# Altium footprint library 2.10-LQFP封装.PcbLib: 97 footprints (part 6 of 7)
Each footprint in its own frame and in the unit in brackets; x right, y up, seen from the top. Pads: shape width x height; smd on the part's side, far side on the other; paste and mask are expansions set on the pad; w line width, h text height; cw(c..) or ccw(c..) is an arc to the next point about the centre after c.
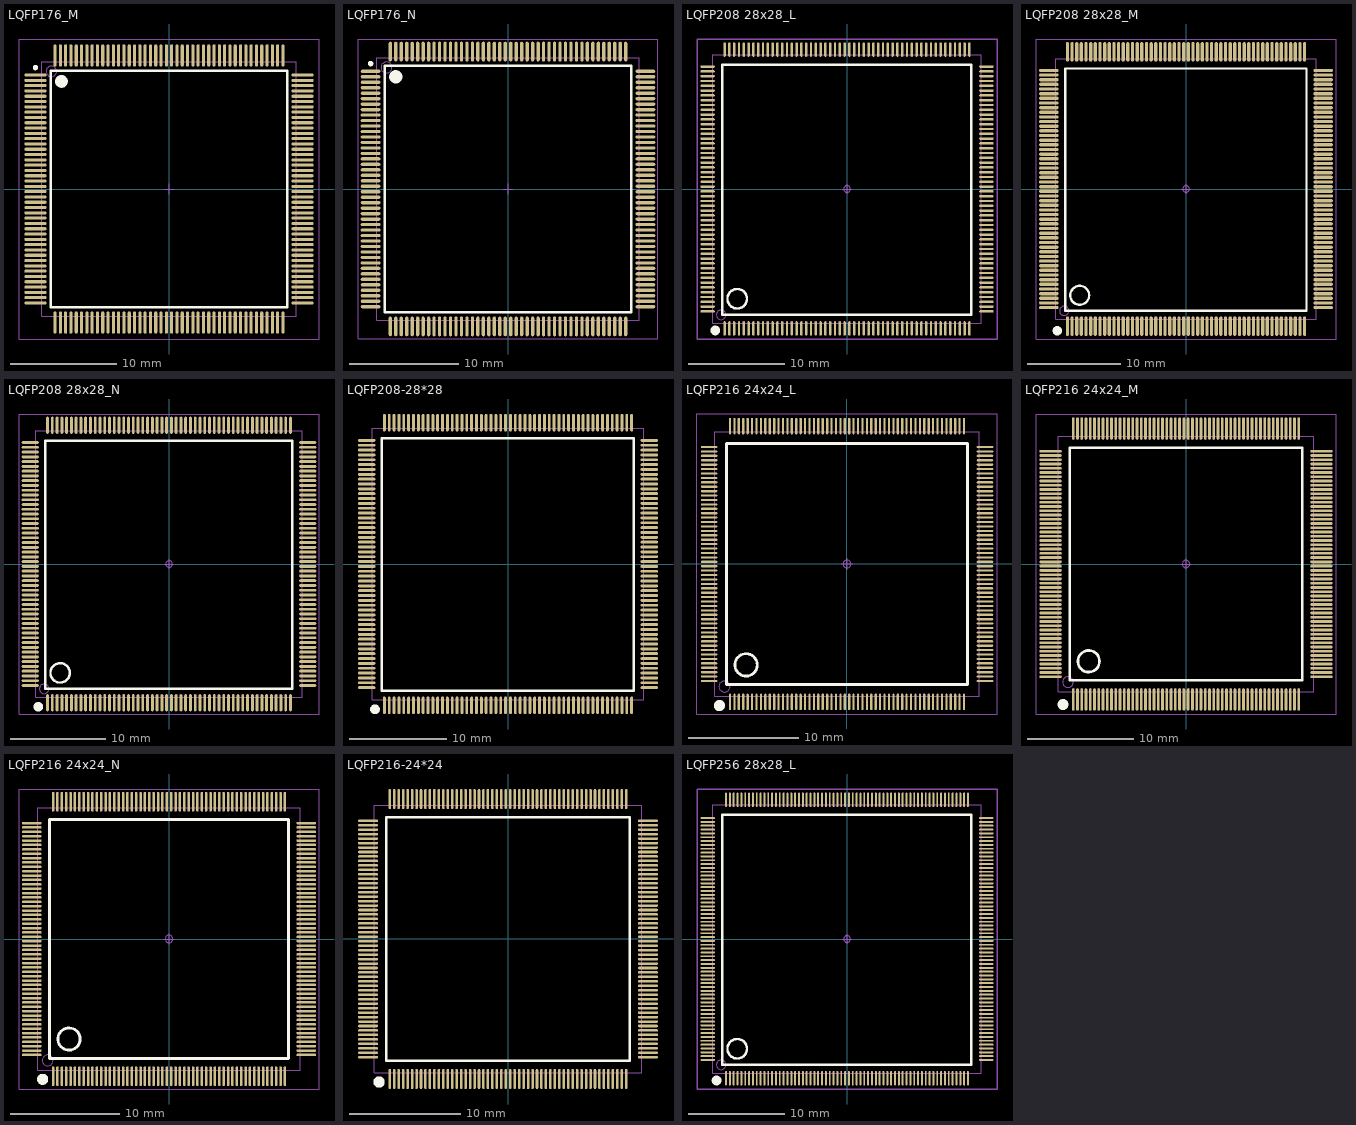
[diagram p5: the footprints below, top view; thin cyan lines are the x and y axes]

## LQFP176_M [mm] "Thin QFP, 176-Leads, Body 24x24mm, Pitch 0.5mm, IPC Low Density"
height 1.6
pads (176):
  oval 2.1x0.3 smd: 1(-12.6,10.75) 2(-12.6,10.25) 3(-12.6,9.75) 4(-12.6,9.25) 5(-12.6,8.75) 6(-12.6,8.25) 7(-12.6,7.75) 8(-12.6,7.25) 9(-12.6,6.75) 10(-12.6,6.25) 11(-12.6,5.75) 12(-12.6,5.25) 13(-12.6,4.75) 14(-12.6,4.25) 15(-12.6,3.75) 16(-12.6,3.25) 17(-12.6,2.75) 18(-12.6,2.25) 19(-12.6,1.75) 20(-12.6,1.25) 21(-12.6,0.75) 22(-12.6,0.25) 23(-12.6,-0.25) 24(-12.6,-0.75) 25(-12.6,-1.25) 26(-12.6,-1.75) 27(-12.6,-2.25) 28(-12.6,-2.75) 29(-12.6,-3.25) 30(-12.6,-3.75) 31(-12.6,-4.25) 32(-12.6,-4.75) 33(-12.6,-5.25) 34(-12.6,-5.75) 35(-12.6,-6.25) 36(-12.6,-6.75) 37(-12.6,-7.25) 38(-12.6,-7.75) 39(-12.6,-8.25) 40(-12.6,-8.75) 41(-12.6,-9.25) 42(-12.6,-9.75) 43(-12.6,-10.25) 44(-12.6,-10.75) 89(12.6,-10.75) 90(12.6,-10.25) 91(12.6,-9.75) 92(12.6,-9.25) 93(12.6,-8.75) 94(12.6,-8.25) 95(12.6,-7.75) 96(12.6,-7.25) 97(12.6,-6.75) 98(12.6,-6.25) 99(12.6,-5.75) 100(12.6,-5.25) 101(12.6,-4.75) 102(12.6,-4.25) 103(12.6,-3.75) 104(12.6,-3.25) 105(12.6,-2.75) 106(12.6,-2.25) 107(12.6,-1.75) 108(12.6,-1.25) 109(12.6,-0.75) 110(12.6,-0.25) 111(12.6,0.25) 112(12.6,0.75) 113(12.6,1.25) 114(12.6,1.75) 115(12.6,2.25) 116(12.6,2.75) 117(12.6,3.25) 118(12.6,3.75) 119(12.6,4.25) 120(12.6,4.75) 121(12.6,5.25) 122(12.6,5.75) 123(12.6,6.25) 124(12.6,6.75) 125(12.6,7.25) 126(12.6,7.75) 127(12.6,8.25) 128(12.6,8.75) 129(12.6,9.25) 130(12.6,9.75) 131(12.6,10.25) 132(12.6,10.75)
  oval 0.3x2.1 smd: 45(-10.75,-12.6) 46(-10.25,-12.6) 47(-9.75,-12.6) 48(-9.25,-12.6) 49(-8.75,-12.6) 50(-8.25,-12.6) 51(-7.75,-12.6) 52(-7.25,-12.6) 53(-6.75,-12.6) 54(-6.25,-12.6) 55(-5.75,-12.6) 56(-5.25,-12.6) 57(-4.75,-12.6) 58(-4.25,-12.6) 59(-3.75,-12.6) 60(-3.25,-12.6) 61(-2.75,-12.6) 62(-2.25,-12.6) 63(-1.75,-12.6) 64(-1.25,-12.6) 65(-0.75,-12.6) 66(-0.25,-12.6) 67(0.25,-12.6) 68(0.75,-12.6) 69(1.25,-12.6) 70(1.75,-12.6) 71(2.25,-12.6) 72(2.75,-12.6) 73(3.25,-12.6) 74(3.75,-12.6) 75(4.25,-12.6) 76(4.75,-12.6) 77(5.25,-12.6) 78(5.75,-12.6) 79(6.25,-12.6) 80(6.75,-12.6) 81(7.25,-12.6) 82(7.75,-12.6) 83(8.25,-12.6) 84(8.75,-12.6) 85(9.25,-12.6) 86(9.75,-12.6) 87(10.25,-12.6) 88(10.75,-12.6) 133(10.75,12.6) 134(10.25,12.6) 135(9.75,12.6) 136(9.25,12.6) 137(8.75,12.6) 138(8.25,12.6) 139(7.75,12.6) 140(7.25,12.6) 141(6.75,12.6) 142(6.25,12.6) 143(5.75,12.6) 144(5.25,12.6) 145(4.75,12.6) 146(4.25,12.6) 147(3.75,12.6) 148(3.25,12.6) 149(2.75,12.6) 150(2.25,12.6) 151(1.75,12.6) 152(1.25,12.6) 153(0.75,12.6) 154(0.25,12.6) 155(-0.25,12.6) 156(-0.75,12.6) 157(-1.25,12.6) 158(-1.75,12.6) 159(-2.25,12.6) 160(-2.75,12.6) 161(-3.25,12.6) 162(-3.75,12.6) 163(-4.25,12.6) 164(-4.75,12.6) 165(-5.25,12.6) 166(-5.75,12.6) 167(-6.25,12.6) 168(-6.75,12.6) 169(-7.25,12.6) 170(-7.75,12.6) 171(-8.25,12.6) 172(-8.75,12.6) 173(-9.25,12.6) 174(-9.75,12.6) 175(-10.25,12.6) 176(-10.75,12.6)
Top Overlay:
  circle w0.6: c-10.15,10.15 r0.3
  circle w0.25: c-12.6,11.45 r0.125
  lines w0.2: -11.15,-11.15 11.15,-11.15 11.15,11.15 -11.15,11.15 -11.15,-11.15
Mechanical 13:
  circle w0.1: c-11.1,11.1 r0.5
  lines w0.1: -12,-12 12,-12 12,12 -12,12 -12,-12
Mechanical 15:
  lines w0.05: -14.15,-14.15 14.15,-14.15 14.15,14.15 -14.15,14.15 -14.15,-14.15
  lines w0.1: -0.5,0 0.5,0 ; 0,-0.5 0,0.5
3D body: height 1.6, standoff 0, extent -12,-12 12,12

## LQFP176_N [mm] "Thin QFP, 176-Leads, Body 24x24mm, Pitch 0.5mm, IPC Medium Density"
height 1.6
pads (176):
  oval 1.8x0.3 smd: 1(-12.55,10.75) 2(-12.55,10.25) 3(-12.55,9.75) 4(-12.55,9.25) 5(-12.55,8.75) 6(-12.55,8.25) 7(-12.55,7.75) 8(-12.55,7.25) 9(-12.55,6.75) 10(-12.55,6.25) 11(-12.55,5.75) 12(-12.55,5.25) 13(-12.55,4.75) 14(-12.55,4.25) 15(-12.55,3.75) 16(-12.55,3.25) 17(-12.55,2.75) 18(-12.55,2.25) 19(-12.55,1.75) 20(-12.55,1.25) 21(-12.55,0.75) 22(-12.55,0.25) 23(-12.55,-0.25) 24(-12.55,-0.75) 25(-12.55,-1.25) 26(-12.55,-1.75) 27(-12.55,-2.25) 28(-12.55,-2.75) 29(-12.55,-3.25) 30(-12.55,-3.75) 31(-12.55,-4.25) 32(-12.55,-4.75) 33(-12.55,-5.25) 34(-12.55,-5.75) 35(-12.55,-6.25) 36(-12.55,-6.75) 37(-12.55,-7.25) 38(-12.55,-7.75) 39(-12.55,-8.25) 40(-12.55,-8.75) 41(-12.55,-9.25) 42(-12.55,-9.75) 43(-12.55,-10.25) 44(-12.55,-10.75) 89(12.55,-10.75) 90(12.55,-10.25) 91(12.55,-9.75) 92(12.55,-9.25) 93(12.55,-8.75) 94(12.55,-8.25) 95(12.55,-7.75) 96(12.55,-7.25) 97(12.55,-6.75) 98(12.55,-6.25) 99(12.55,-5.75) 100(12.55,-5.25) 101(12.55,-4.75) 102(12.55,-4.25) 103(12.55,-3.75) 104(12.55,-3.25) 105(12.55,-2.75) 106(12.55,-2.25) 107(12.55,-1.75) 108(12.55,-1.25) 109(12.55,-0.75) 110(12.55,-0.25) 111(12.55,0.25) 112(12.55,0.75) 113(12.55,1.25) 114(12.55,1.75) 115(12.55,2.25) 116(12.55,2.75) 117(12.55,3.25) 118(12.55,3.75) 119(12.55,4.25) 120(12.55,4.75) 121(12.55,5.25) 122(12.55,5.75) 123(12.55,6.25) 124(12.55,6.75) 125(12.55,7.25) 126(12.55,7.75) 127(12.55,8.25) 128(12.55,8.75) 129(12.55,9.25) 130(12.55,9.75) 131(12.55,10.25) 132(12.55,10.75)
  oval 0.3x1.8 smd: 45(-10.75,-12.55) 46(-10.25,-12.55) 47(-9.75,-12.55) 48(-9.25,-12.55) 49(-8.75,-12.55) 50(-8.25,-12.55) 51(-7.75,-12.55) 52(-7.25,-12.55) 53(-6.75,-12.55) 54(-6.25,-12.55) 55(-5.75,-12.55) 56(-5.25,-12.55) 57(-4.75,-12.55) 58(-4.25,-12.55) 59(-3.75,-12.55) 60(-3.25,-12.55) 61(-2.75,-12.55) 62(-2.25,-12.55) 63(-1.75,-12.55) 64(-1.25,-12.55) 65(-0.75,-12.55) 66(-0.25,-12.55) 67(0.25,-12.55) 68(0.75,-12.55) 69(1.25,-12.55) 70(1.75,-12.55) 71(2.25,-12.55) 72(2.75,-12.55) 73(3.25,-12.55) 74(3.75,-12.55) 75(4.25,-12.55) 76(4.75,-12.55) 77(5.25,-12.55) 78(5.75,-12.55) 79(6.25,-12.55) 80(6.75,-12.55) 81(7.25,-12.55) 82(7.75,-12.55) 83(8.25,-12.55) 84(8.75,-12.55) 85(9.25,-12.55) 86(9.75,-12.55) 87(10.25,-12.55) 88(10.75,-12.55) 133(10.75,12.55) 134(10.25,12.55) 135(9.75,12.55) 136(9.25,12.55) 137(8.75,12.55) 138(8.25,12.55) 139(7.75,12.55) 140(7.25,12.55) 141(6.75,12.55) 142(6.25,12.55) 143(5.75,12.55) 144(5.25,12.55) 145(4.75,12.55) 146(4.25,12.55) 147(3.75,12.55) 148(3.25,12.55) 149(2.75,12.55) 150(2.25,12.55) 151(1.75,12.55) 152(1.25,12.55) 153(0.75,12.55) 154(0.25,12.55) 155(-0.25,12.55) 156(-0.75,12.55) 157(-1.25,12.55) 158(-1.75,12.55) 159(-2.25,12.55) 160(-2.75,12.55) 161(-3.25,12.55) 162(-3.75,12.55) 163(-4.25,12.55) 164(-4.75,12.55) 165(-5.25,12.55) 166(-5.75,12.55) 167(-6.25,12.55) 168(-6.75,12.55) 169(-7.25,12.55) 170(-7.75,12.55) 171(-8.25,12.55) 172(-8.75,12.55) 173(-9.25,12.55) 174(-9.75,12.55) 175(-10.25,12.55) 176(-10.75,12.55)
Top Overlay:
  circle w0.25: c-12.55,11.45 r0.125
  circle w0.6: c-10.25,10.25 r0.3
  lines w0.2: -11.25,-11.25 -11.25,11.25 11.25,11.25 11.25,-11.25 -11.25,-11.25
Mechanical 13:
  circle w0.1: c-11.1,11.1 r0.5
  lines w0.1: -12,-12 -12,12 12,12 12,-12 -12,-12
Mechanical 15:
  lines w0.05: -13.7,-13.7 -13.7,13.7 13.7,13.7 13.7,-13.7 -13.7,-13.7
  lines w0.1: -0.5,0 0.5,0 ; 0,-0.5 0,0.5
3D body: height 1.6, standoff 0, extent -12,-12 12,12

## LQFP208 28x28_L [mm] "208脚，体宽28x28mm，脚距0.5mm"
height 4.3
pads (208):
  oval 0.25x1.5 smd: 1(-12.75,-14.518) 2(-12.25,-14.518) 3(-11.75,-14.518) 4(-11.25,-14.518) 5(-10.75,-14.518) 6(-10.25,-14.518) 7(-9.75,-14.518) 8(-9.25,-14.518) 9(-8.75,-14.518) 10(-8.25,-14.518) 11(-7.75,-14.518) 12(-7.25,-14.518) 13(-6.75,-14.518) 14(-6.25,-14.518) 15(-5.75,-14.518) 16(-5.25,-14.518) 17(-4.75,-14.518) 18(-4.25,-14.518) 19(-3.75,-14.518) 20(-3.25,-14.518) 21(-2.75,-14.518) 22(-2.25,-14.518) 23(-1.75,-14.518) 24(-1.25,-14.518) 25(-0.75,-14.518) 26(-0.25,-14.518) 27(0.25,-14.518) 28(0.75,-14.518) 29(1.25,-14.518) 30(1.75,-14.518) 31(2.25,-14.518) 32(2.75,-14.518) 33(3.25,-14.518) 34(3.75,-14.518) 35(4.25,-14.518) 36(4.75,-14.518) 37(5.25,-14.518) 38(5.75,-14.518) 39(6.25,-14.518) 40(6.75,-14.518) 41(7.25,-14.518) 42(7.75,-14.518) 43(8.25,-14.518) 44(8.75,-14.518) 45(9.25,-14.518) 46(9.75,-14.518) 47(10.25,-14.518) 48(10.75,-14.518) 49(11.25,-14.518) 50(11.75,-14.518) 51(12.25,-14.518) 52(12.75,-14.518) 105(12.75,14.518) 106(12.25,14.518) 107(11.75,14.518) 108(11.25,14.518) 109(10.75,14.518) 110(10.25,14.518) 111(9.75,14.518) 112(9.25,14.518) 113(8.75,14.518) 114(8.25,14.518) 115(7.75,14.518) 116(7.25,14.518) 117(6.75,14.518) 118(6.25,14.518) 119(5.75,14.518) 120(5.25,14.518) 121(4.75,14.518) 122(4.25,14.518) 123(3.75,14.518) 124(3.25,14.518) 125(2.75,14.518) 126(2.25,14.518) 127(1.75,14.518) 128(1.25,14.518) 129(0.75,14.518) 130(0.25,14.518) 131(-0.25,14.518) 132(-0.75,14.518) 133(-1.25,14.518) 134(-1.75,14.518) 135(-2.25,14.518) 136(-2.75,14.518) 137(-3.25,14.518) 138(-3.75,14.518) 139(-4.25,14.518) 140(-4.75,14.518) 141(-5.25,14.518) 142(-5.75,14.518) 143(-6.25,14.518) 144(-6.75,14.518) 145(-7.25,14.518) 146(-7.75,14.518) 147(-8.25,14.518) 148(-8.75,14.518) 149(-9.25,14.518) 150(-9.75,14.518) 151(-10.25,14.518) 152(-10.75,14.518) 153(-11.25,14.518) 154(-11.75,14.518) 155(-12.25,14.518) 156(-12.75,14.518)
  oval 1.5x0.25 smd: 53(14.518,-12.75) 54(14.518,-12.25) 55(14.518,-11.75) 56(14.518,-11.25) 57(14.518,-10.75) 58(14.518,-10.25) 59(14.518,-9.75) 60(14.518,-9.25) 61(14.518,-8.75) 62(14.518,-8.25) 63(14.518,-7.75) 64(14.518,-7.25) 65(14.518,-6.75) 66(14.518,-6.25) 67(14.518,-5.75) 68(14.518,-5.25) 69(14.518,-4.75) 70(14.518,-4.25) 71(14.518,-3.75) 72(14.518,-3.25) 73(14.518,-2.75) 74(14.518,-2.25) 75(14.518,-1.75) 76(14.518,-1.25) 77(14.518,-0.75) 78(14.518,-0.25) 79(14.518,0.25) 80(14.518,0.75) 81(14.518,1.25) 82(14.518,1.75) 83(14.518,2.25) 84(14.518,2.75) 85(14.518,3.25) 86(14.518,3.75) 87(14.518,4.25) 88(14.518,4.75) 89(14.518,5.25) 90(14.518,5.75) 91(14.518,6.25) 92(14.518,6.75) 93(14.518,7.25) 94(14.518,7.75) 95(14.518,8.25) 96(14.518,8.75) 97(14.518,9.25) 98(14.518,9.75) 99(14.518,10.25) 100(14.518,10.75) 101(14.518,11.25) 102(14.518,11.75) 103(14.518,12.25) 104(14.518,12.75) 157(-14.518,12.75) 158(-14.518,12.25) 159(-14.518,11.75) 160(-14.518,11.25) 161(-14.518,10.75) 162(-14.518,10.25) 163(-14.518,9.75) 164(-14.518,9.25) 165(-14.518,8.75) 166(-14.518,8.25) 167(-14.518,7.75) 168(-14.518,7.25) 169(-14.518,6.75) 170(-14.518,6.25) 171(-14.518,5.75) 172(-14.518,5.25) 173(-14.518,4.75) 174(-14.518,4.25) 175(-14.518,3.75) 176(-14.518,3.25) 177(-14.518,2.75) 178(-14.518,2.25) 179(-14.518,1.75) 180(-14.518,1.25) 181(-14.518,0.75) 182(-14.518,0.25) 183(-14.518,-0.25) 184(-14.518,-0.75) 185(-14.518,-1.25) 186(-14.518,-1.75) 187(-14.518,-2.25) 188(-14.518,-2.75) 189(-14.518,-3.25) 190(-14.518,-3.75) 191(-14.518,-4.25) 192(-14.518,-4.75) 193(-14.518,-5.25) 194(-14.518,-5.75) 195(-14.518,-6.25) 196(-14.518,-6.75) 197(-14.518,-7.25) 198(-14.518,-7.75) 199(-14.518,-8.25) 200(-14.518,-8.75) 201(-14.518,-9.25) 202(-14.518,-9.75) 203(-14.518,-10.25) 204(-14.518,-10.75) 205(-14.518,-11.25) 206(-14.518,-11.75) 207(-14.518,-12.25) 208(-14.518,-12.75)
Top Overlay:
  circle w0.254: c-11.43,-11.43 r1.016
  circle w0.508: c-13.716,-14.732 r0.25
  lines w0.254: -13,-13.081 -13,12.954 12.954,12.954 12.954,-13.081 -13,-13.081
Mechanical 13:
  circle w0.1: c-13.1,-13.1 r0.5
  lines w0.1: -14,-14 -14,14 14,14 14,-14 -14,-14
Mechanical 15:
  circle w0.05: c0,0 r0.35
  lines w0.05: -0.5,0 0.5,0 ; 0,-0.5 0,0.5
  lines w0.15: -15.621,-15.621 -15.621,15.621 15.621,15.621 15.621,-15.621 -15.621,-15.621
3D body "LQFP208-28x28.STEP": height 1.45, standoff -0.01, extent -15.003,-15.003 15.003,15.003

## LQFP208 28x28_M [mm] "208脚，体宽28x28mm，脚距0.5mm"
height 4.3
pads (208):
  oval 0.35x2.1 smd: 1(-12.75,-14.745) 2(-12.25,-14.745) 3(-11.75,-14.745) 4(-11.25,-14.745) 5(-10.75,-14.745) 6(-10.25,-14.745) 7(-9.75,-14.745) 8(-9.25,-14.745) 9(-8.75,-14.745) 10(-8.25,-14.745) 11(-7.75,-14.745) 12(-7.25,-14.745) 13(-6.75,-14.745) 14(-6.25,-14.745) 15(-5.75,-14.745) 16(-5.25,-14.745) 17(-4.75,-14.745) 18(-4.25,-14.745) 19(-3.75,-14.745) 20(-3.25,-14.745) 21(-2.75,-14.745) 22(-2.25,-14.745) 23(-1.75,-14.745) 24(-1.25,-14.745) 25(-0.75,-14.745) 26(-0.25,-14.745) 27(0.25,-14.745) 28(0.75,-14.745) 29(1.25,-14.745) 30(1.75,-14.745) 31(2.25,-14.745) 32(2.75,-14.745) 33(3.25,-14.745) 34(3.75,-14.745) 35(4.25,-14.745) 36(4.75,-14.745) 37(5.25,-14.745) 38(5.75,-14.745) 39(6.25,-14.745) 40(6.75,-14.745) 41(7.25,-14.745) 42(7.75,-14.745) 43(8.25,-14.745) 44(8.75,-14.745) 45(9.25,-14.745) 46(9.75,-14.745) 47(10.25,-14.745) 48(10.75,-14.745) 49(11.25,-14.745) 50(11.75,-14.745) 51(12.25,-14.745) 52(12.75,-14.745) 105(12.75,14.745) 106(12.25,14.745) 107(11.75,14.745) 108(11.25,14.745) 109(10.75,14.745) 110(10.25,14.745) 111(9.75,14.745) 112(9.25,14.745) 113(8.75,14.745) 114(8.25,14.745) 115(7.75,14.745) 116(7.25,14.745) 117(6.75,14.745) 118(6.25,14.745) 119(5.75,14.745) 120(5.25,14.745) 121(4.75,14.745) 122(4.25,14.745) 123(3.75,14.745) 124(3.25,14.745) 125(2.75,14.745) 126(2.25,14.745) 127(1.75,14.745) 128(1.25,14.745) 129(0.75,14.745) 130(0.25,14.745) 131(-0.25,14.745) 132(-0.75,14.745) 133(-1.25,14.745) 134(-1.75,14.745) 135(-2.25,14.745) 136(-2.75,14.745) 137(-3.25,14.745) 138(-3.75,14.745) 139(-4.25,14.745) 140(-4.75,14.745) 141(-5.25,14.745) 142(-5.75,14.745) 143(-6.25,14.745) 144(-6.75,14.745) 145(-7.25,14.745) 146(-7.75,14.745) 147(-8.25,14.745) 148(-8.75,14.745) 149(-9.25,14.745) 150(-9.75,14.745) 151(-10.25,14.745) 152(-10.75,14.745) 153(-11.25,14.745) 154(-11.75,14.745) 155(-12.25,14.745) 156(-12.75,14.745)
  oval 2.1x0.35 smd: 53(14.745,-12.75) 54(14.745,-12.25) 55(14.745,-11.75) 56(14.745,-11.25) 57(14.745,-10.75) 58(14.745,-10.25) 59(14.745,-9.75) 60(14.745,-9.25) 61(14.745,-8.75) 62(14.745,-8.25) 63(14.745,-7.75) 64(14.745,-7.25) 65(14.745,-6.75) 66(14.745,-6.25) 67(14.745,-5.75) 68(14.745,-5.25) 69(14.745,-4.75) 70(14.745,-4.25) 71(14.745,-3.75) 72(14.745,-3.25) 73(14.745,-2.75) 74(14.745,-2.25) 75(14.745,-1.75) 76(14.745,-1.25) 77(14.745,-0.75) 78(14.745,-0.25) 79(14.745,0.25) 80(14.745,0.75) 81(14.745,1.25) 82(14.745,1.75) 83(14.745,2.25) 84(14.745,2.75) 85(14.745,3.25) 86(14.745,3.75) 87(14.745,4.25) 88(14.745,4.75) 89(14.745,5.25) 90(14.745,5.75) 91(14.745,6.25) 92(14.745,6.75) 93(14.745,7.25) 94(14.745,7.75) 95(14.745,8.25) 96(14.745,8.75) 97(14.745,9.25) 98(14.745,9.75) 99(14.745,10.25) 100(14.745,10.75) 101(14.745,11.25) 102(14.745,11.75) 103(14.745,12.25) 104(14.745,12.75) 157(-14.745,12.75) 158(-14.745,12.25) 159(-14.745,11.75) 160(-14.745,11.25) 161(-14.745,10.75) 162(-14.745,10.25) 163(-14.745,9.75) 164(-14.745,9.25) 165(-14.745,8.75) 166(-14.745,8.25) 167(-14.745,7.75) 168(-14.745,7.25) 169(-14.745,6.75) 170(-14.745,6.25) 171(-14.745,5.75) 172(-14.745,5.25) 173(-14.745,4.75) 174(-14.745,4.25) 175(-14.745,3.75) 176(-14.745,3.25) 177(-14.745,2.75) 178(-14.745,2.25) 179(-14.745,1.75) 180(-14.745,1.25) 181(-14.745,0.75) 182(-14.745,0.25) 183(-14.745,-0.25) 184(-14.745,-0.75) 185(-14.745,-1.25) 186(-14.745,-1.75) 187(-14.745,-2.25) 188(-14.745,-2.75) 189(-14.745,-3.25) 190(-14.745,-3.75) 191(-14.745,-4.25) 192(-14.745,-4.75) 193(-14.745,-5.25) 194(-14.745,-5.75) 195(-14.745,-6.25) 196(-14.745,-6.75) 197(-14.745,-7.25) 198(-14.745,-7.75) 199(-14.745,-8.25) 200(-14.745,-8.75) 201(-14.745,-9.25) 202(-14.745,-9.75) 203(-14.745,-10.25) 204(-14.745,-10.75) 205(-14.745,-11.25) 206(-14.745,-11.75) 207(-14.745,-12.25) 208(-14.745,-12.75)
Top Overlay:
  circle w0.254: c-11.43,-11.43 r1.016
  circle w0.508: c-13.843,-15.24 r0.25
  lines w0.254: -13,-13.081 12.954,-13.081 12.954,12.954 -13,12.954 -13,-13.081
Mechanical 13:
  circle w0.1: c-13.1,-13.1 r0.5
  lines w0.1: -14,-14 -14,14 14,14 14,-14 -14,-14
Mechanical 15:
  circle w0.05: c0,0 r0.35
  lines w0.05: -0.5,0 0.5,0 ; 0,-0.5 0,0.5
  lines w0.1: -16.129,-16.129 16.129,-16.129 16.129,16.129 -16.129,16.129 -16.129,-16.129
3D body "LQFP208-28x28.STEP": height 1.45, standoff -0.01, extent -15.003,-15.003 15.003,15.003

## LQFP208 28x28_N [mm] "208脚，体宽28x28mm，脚距0.5mm      淘宝ID:黄晶宝石"
height 4.3
pads (208):
  oval 0.3x1.8 smd: 1(-12.75,-14.568) 2(-12.25,-14.568) 3(-11.75,-14.568) 4(-11.25,-14.568) 5(-10.75,-14.568) 6(-10.25,-14.568) 7(-9.75,-14.568) 8(-9.25,-14.568) 9(-8.75,-14.568) 10(-8.25,-14.568) 11(-7.75,-14.568) 12(-7.25,-14.568) 13(-6.75,-14.568) 14(-6.25,-14.568) 15(-5.75,-14.568) 16(-5.25,-14.568) 17(-4.75,-14.568) 18(-4.25,-14.568) 19(-3.75,-14.568) 20(-3.25,-14.568) 21(-2.75,-14.568) 22(-2.25,-14.568) 23(-1.75,-14.568) 24(-1.25,-14.568) 25(-0.75,-14.568) 26(-0.25,-14.568) 27(0.25,-14.568) 28(0.75,-14.568) 29(1.25,-14.568) 30(1.75,-14.568) 31(2.25,-14.568) 32(2.75,-14.568) 33(3.25,-14.568) 34(3.75,-14.568) 35(4.25,-14.568) 36(4.75,-14.568) 37(5.25,-14.568) 38(5.75,-14.568) 39(6.25,-14.568) 40(6.75,-14.568) 41(7.25,-14.568) 42(7.75,-14.568) 43(8.25,-14.568) 44(8.75,-14.568) 45(9.25,-14.568) 46(9.75,-14.568) 47(10.25,-14.568) 48(10.75,-14.568) 49(11.25,-14.568) 50(11.75,-14.568) 51(12.25,-14.568) 52(12.75,-14.568) 105(12.75,14.568) 106(12.25,14.568) 107(11.75,14.568) 108(11.25,14.568) 109(10.75,14.568) 110(10.25,14.568) 111(9.75,14.568) 112(9.25,14.568) 113(8.75,14.568) 114(8.25,14.568) 115(7.75,14.568) 116(7.25,14.568) 117(6.75,14.568) 118(6.25,14.568) 119(5.75,14.568) 120(5.25,14.568) 121(4.75,14.568) 122(4.25,14.568) 123(3.75,14.568) 124(3.25,14.568) 125(2.75,14.568) 126(2.25,14.568) 127(1.75,14.568) 128(1.25,14.568) 129(0.75,14.568) 130(0.25,14.568) 131(-0.25,14.568) 132(-0.75,14.568) 133(-1.25,14.568) 134(-1.75,14.568) 135(-2.25,14.568) 136(-2.75,14.568) 137(-3.25,14.568) 138(-3.75,14.568) 139(-4.25,14.568) 140(-4.75,14.568) 141(-5.25,14.568) 142(-5.75,14.568) 143(-6.25,14.568) 144(-6.75,14.568) 145(-7.25,14.568) 146(-7.75,14.568) 147(-8.25,14.568) 148(-8.75,14.568) 149(-9.25,14.568) 150(-9.75,14.568) 151(-10.25,14.568) 152(-10.75,14.568) 153(-11.25,14.568) 154(-11.75,14.568) 155(-12.25,14.568) 156(-12.75,14.568)
  oval 1.8x0.3 smd: 53(14.568,-12.75) 54(14.568,-12.25) 55(14.568,-11.75) 56(14.568,-11.25) 57(14.568,-10.75) 58(14.568,-10.25) 59(14.568,-9.75) 60(14.568,-9.25) 61(14.568,-8.75) 62(14.568,-8.25) 63(14.568,-7.75) 64(14.568,-7.25) 65(14.568,-6.75) 66(14.568,-6.25) 67(14.568,-5.75) 68(14.568,-5.25) 69(14.568,-4.75) 70(14.568,-4.25) 71(14.568,-3.75) 72(14.568,-3.25) 73(14.568,-2.75) 74(14.568,-2.25) 75(14.568,-1.75) 76(14.568,-1.25) 77(14.568,-0.75) 78(14.568,-0.25) 79(14.568,0.25) 80(14.568,0.75) 81(14.568,1.25) 82(14.568,1.75) 83(14.568,2.25) 84(14.568,2.75) 85(14.568,3.25) 86(14.568,3.75) 87(14.568,4.25) 88(14.568,4.75) 89(14.568,5.25) 90(14.568,5.75) 91(14.568,6.25) 92(14.568,6.75) 93(14.568,7.25) 94(14.568,7.75) 95(14.568,8.25) 96(14.568,8.75) 97(14.568,9.25) 98(14.568,9.75) 99(14.568,10.25) 100(14.568,10.75) 101(14.568,11.25) 102(14.568,11.75) 103(14.568,12.25) 104(14.568,12.75) 157(-14.568,12.75) 158(-14.568,12.25) 159(-14.568,11.75) 160(-14.568,11.25) 161(-14.568,10.75) 162(-14.568,10.25) 163(-14.568,9.75) 164(-14.568,9.25) 165(-14.568,8.75) 166(-14.568,8.25) 167(-14.568,7.75) 168(-14.568,7.25) 169(-14.568,6.75) 170(-14.568,6.25) 171(-14.568,5.75) 172(-14.568,5.25) 173(-14.568,4.75) 174(-14.568,4.25) 175(-14.568,3.75) 176(-14.568,3.25) 177(-14.568,2.75) 178(-14.568,2.25) 179(-14.568,1.75) 180(-14.568,1.25) 181(-14.568,0.75) 182(-14.568,0.25) 183(-14.568,-0.25) 184(-14.568,-0.75) 185(-14.568,-1.25) 186(-14.568,-1.75) 187(-14.568,-2.25) 188(-14.568,-2.75) 189(-14.568,-3.25) 190(-14.568,-3.75) 191(-14.568,-4.25) 192(-14.568,-4.75) 193(-14.568,-5.25) 194(-14.568,-5.75) 195(-14.568,-6.25) 196(-14.568,-6.75) 197(-14.568,-7.25) 198(-14.568,-7.75) 199(-14.568,-8.25) 200(-14.568,-8.75) 201(-14.568,-9.25) 202(-14.568,-9.75) 203(-14.568,-10.25) 204(-14.568,-10.75) 205(-14.568,-11.25) 206(-14.568,-11.75) 207(-14.568,-12.25) 208(-14.568,-12.75)
Top Overlay:
  circle w0.508: c-13.716,-14.986 r0.25
  circle w0.254: c-11.43,-11.43 r1.016
  lines w0.254: -13,-13.081 -13,12.954 12.954,12.954 12.954,-13.081 -13,-13.081
Mechanical 13:
  circle w0.1: c-13.1,-13.1 r0.5
  lines w0.1: -14,-14 14,-14 14,14 -14,14 -14,-14
Mechanical 15:
  circle w0.05: c0,0 r0.35
  lines w0.05: -0.5,0 0.5,0 ; 0,-0.5 0,0.5
  lines w0.1: -15.748,-15.748 -15.748,15.748 15.748,15.748 15.748,-15.748 -15.748,-15.748
3D body "LQFP208-28x28.STEP": height 1.45, standoff -0.01, extent -15.003,-15.003 15.003,15.003

## LQFP208-28*28 [mm] "28x28mm，0.5mm       淘宝ID:黄晶宝石"
height 4.3
pads (208):
  oval 0.3x1.8 smd: 1(-12.75,-14.568) 2(-12.25,-14.568) 3(-11.75,-14.568) 4(-11.25,-14.568) 5(-10.75,-14.568) 6(-10.25,-14.568) 7(-9.75,-14.568) 8(-9.25,-14.568) 9(-8.75,-14.568) 10(-8.25,-14.568) 11(-7.75,-14.568) 12(-7.25,-14.568) 13(-6.75,-14.568) 14(-6.25,-14.568) 15(-5.75,-14.568) 16(-5.25,-14.568) 17(-4.75,-14.568) 18(-4.25,-14.568) 19(-3.75,-14.568) 20(-3.25,-14.568) 21(-2.75,-14.568) 22(-2.25,-14.568) 23(-1.75,-14.568) 24(-1.25,-14.568) 25(-0.75,-14.568) 26(-0.25,-14.568) 27(0.25,-14.568) 28(0.75,-14.568) 29(1.25,-14.568) 30(1.75,-14.568) 31(2.25,-14.568) 32(2.75,-14.568) 33(3.25,-14.568) 34(3.75,-14.568) 35(4.25,-14.568) 36(4.75,-14.568) 37(5.25,-14.568) 38(5.75,-14.568) 39(6.25,-14.568) 40(6.75,-14.568) 41(7.25,-14.568) 42(7.75,-14.568) 43(8.25,-14.568) 44(8.75,-14.568) 45(9.25,-14.568) 46(9.75,-14.568) 47(10.25,-14.568) 48(10.75,-14.568) 49(11.25,-14.568) 50(11.75,-14.568) 51(12.25,-14.568) 52(12.75,-14.568) 105(12.75,14.568) 106(12.25,14.568) 107(11.75,14.568) 108(11.25,14.568) 109(10.75,14.568) 110(10.25,14.568) 111(9.75,14.568) 112(9.25,14.568) 113(8.75,14.568) 114(8.25,14.568) 115(7.75,14.568) 116(7.25,14.568) 117(6.75,14.568) 118(6.25,14.568) 119(5.75,14.568) 120(5.25,14.568) 121(4.75,14.568) 122(4.25,14.568) 123(3.75,14.568) 124(3.25,14.568) 125(2.75,14.568) 126(2.25,14.568) 127(1.75,14.568) 128(1.25,14.568) 129(0.75,14.568) 130(0.25,14.568) 131(-0.25,14.568) 132(-0.75,14.568) 133(-1.25,14.568) 134(-1.75,14.568) 135(-2.25,14.568) 136(-2.75,14.568) 137(-3.25,14.568) 138(-3.75,14.568) 139(-4.25,14.568) 140(-4.75,14.568) 141(-5.25,14.568) 142(-5.75,14.568) 143(-6.25,14.568) 144(-6.75,14.568) 145(-7.25,14.568) 146(-7.75,14.568) 147(-8.25,14.568) 148(-8.75,14.568) 149(-9.25,14.568) 150(-9.75,14.568) 151(-10.25,14.568) 152(-10.75,14.568) 153(-11.25,14.568) 154(-11.75,14.568) 155(-12.25,14.568) 156(-12.75,14.568)
  oval 1.8x0.3 smd: 53(14.568,-12.75) 54(14.568,-12.25) 55(14.568,-11.75) 56(14.568,-11.25) 57(14.568,-10.75) 58(14.568,-10.25) 59(14.568,-9.75) 60(14.568,-9.25) 61(14.568,-8.75) 62(14.568,-8.25) 63(14.568,-7.75) 64(14.568,-7.25) 65(14.568,-6.75) 66(14.568,-6.25) 67(14.568,-5.75) 68(14.568,-5.25) 69(14.568,-4.75) 70(14.568,-4.25) 71(14.568,-3.75) 72(14.568,-3.25) 73(14.568,-2.75) 74(14.568,-2.25) 75(14.568,-1.75) 76(14.568,-1.25) 77(14.568,-0.75) 78(14.568,-0.25) 79(14.568,0.25) 80(14.568,0.75) 81(14.568,1.25) 82(14.568,1.75) 83(14.568,2.25) 84(14.568,2.75) 85(14.568,3.25) 86(14.568,3.75) 87(14.568,4.25) 88(14.568,4.75) 89(14.568,5.25) 90(14.568,5.75) 91(14.568,6.25) 92(14.568,6.75) 93(14.568,7.25) 94(14.568,7.75) 95(14.568,8.25) 96(14.568,8.75) 97(14.568,9.25) 98(14.568,9.75) 99(14.568,10.25) 100(14.568,10.75) 101(14.568,11.25) 102(14.568,11.75) 103(14.568,12.25) 104(14.568,12.75) 157(-14.568,12.75) 158(-14.568,12.25) 159(-14.568,11.75) 160(-14.568,11.25) 161(-14.568,10.75) 162(-14.568,10.25) 163(-14.568,9.75) 164(-14.568,9.25) 165(-14.568,8.75) 166(-14.568,8.25) 167(-14.568,7.75) 168(-14.568,7.25) 169(-14.568,6.75) 170(-14.568,6.25) 171(-14.568,5.75) 172(-14.568,5.25) 173(-14.568,4.75) 174(-14.568,4.25) 175(-14.568,3.75) 176(-14.568,3.25) 177(-14.568,2.75) 178(-14.568,2.25) 179(-14.568,1.75) 180(-14.568,1.25) 181(-14.568,0.75) 182(-14.568,0.25) 183(-14.568,-0.25) 184(-14.568,-0.75) 185(-14.568,-1.25) 186(-14.568,-1.75) 187(-14.568,-2.25) 188(-14.568,-2.75) 189(-14.568,-3.25) 190(-14.568,-3.75) 191(-14.568,-4.25) 192(-14.568,-4.75) 193(-14.568,-5.25) 194(-14.568,-5.75) 195(-14.568,-6.25) 196(-14.568,-6.75) 197(-14.568,-7.25) 198(-14.568,-7.75) 199(-14.568,-8.25) 200(-14.568,-8.75) 201(-14.568,-9.25) 202(-14.568,-9.75) 203(-14.568,-10.25) 204(-14.568,-10.75) 205(-14.568,-11.25) 206(-14.568,-11.75) 207(-14.568,-12.25) 208(-14.568,-12.75)
Top Overlay:
  circle w0.508: c-13.716,-14.986 r0.25
  lines w0.254: -13,-13.081 -13,12.954 12.954,12.954 12.954,-13.081 -13,-13.081
Mechanical 13:
  lines w0.1: -14,-14 14,-14 14,14 -14,14 -14,-14
3D body "LQFP208-28x28.STEP": height 1.45, standoff 0, extent -14.986,-14.986 15.02,15.02

## LQFP216 24x24_L [mm] "216脚，体宽24x24mm，脚距0.4mm       淘宝ID:黄晶宝石"
pads (216):
  oval 0.2x1.5 smd: 1(-10.598,-12.498) 2(-10.198,-12.498) 3(-9.798,-12.498) 4(-9.398,-12.498) 5(-8.998,-12.498) 6(-8.598,-12.498) 7(-8.198,-12.498) 8(-7.798,-12.498) 9(-7.398,-12.498) 10(-6.998,-12.498) 11(-6.598,-12.498) 12(-6.198,-12.498) 13(-5.798,-12.498) 14(-5.398,-12.498) 15(-4.998,-12.498) 16(-4.598,-12.498) 17(-4.198,-12.498) 18(-3.798,-12.498) 19(-3.398,-12.498) 20(-2.998,-12.498) 21(-2.598,-12.498) 22(-2.198,-12.498) 23(-1.798,-12.498) 24(-1.398,-12.498) 25(-0.998,-12.498) 26(-0.598,-12.498) 27(-0.198,-12.498) 28(0.202,-12.498) 29(0.602,-12.498) 30(1.002,-12.498) 31(1.402,-12.498) 32(1.802,-12.498) 33(2.202,-12.498) 34(2.602,-12.498) 35(3.002,-12.498) 36(3.402,-12.498) 37(3.802,-12.498) 38(4.202,-12.498) 39(4.602,-12.498) 40(5.002,-12.498) 41(5.402,-12.498) 42(5.802,-12.498) 43(6.202,-12.498) 44(6.602,-12.498) 45(7.002,-12.498) 46(7.402,-12.498) 47(7.802,-12.498) 48(8.202,-12.498) 49(8.602,-12.498) 50(9.002,-12.498) 51(9.402,-12.498) 52(9.802,-12.498) 53(10.202,-12.498) 54(10.602,-12.498) 109(10.602,12.498) 110(10.202,12.498) 111(9.802,12.498) 112(9.402,12.498) 113(9.002,12.498) 114(8.602,12.498) 115(8.202,12.498) 116(7.802,12.498) 117(7.402,12.498) 118(7.002,12.498) 119(6.602,12.498) 120(6.202,12.498) 121(5.802,12.498) 122(5.402,12.498) 123(5.002,12.498) 124(4.602,12.498) 125(4.202,12.498) 126(3.802,12.498) 127(3.402,12.498) 128(3.002,12.498) 129(2.602,12.498) 130(2.202,12.498) 131(1.802,12.498) 132(1.402,12.498) 133(1.002,12.498) 134(0.602,12.498) 135(0.202,12.498) 136(-0.198,12.498) 137(-0.598,12.498) 138(-0.998,12.498) 139(-1.398,12.498) 140(-1.798,12.498) 141(-2.198,12.498) 142(-2.598,12.498) 143(-2.998,12.498) 144(-3.398,12.498) 145(-3.798,12.498) 146(-4.198,12.498) 147(-4.598,12.498) 148(-4.998,12.498) 149(-5.398,12.498) 150(-5.798,12.498) 151(-6.198,12.498) 152(-6.598,12.498) 153(-6.998,12.498) 154(-7.398,12.498) 155(-7.798,12.498) 156(-8.198,12.498) 157(-8.598,12.498) 158(-8.998,12.498) 159(-9.398,12.498) 160(-9.798,12.498) 161(-10.198,12.498) 162(-10.598,12.498)
  oval 1.5x0.2 smd: 55(12.5,-10.6) 56(12.5,-10.2) 57(12.5,-9.8) 58(12.5,-9.4) 59(12.5,-9) 60(12.5,-8.6) 61(12.5,-8.2) 62(12.5,-7.8) 63(12.5,-7.4) 64(12.5,-7) 65(12.5,-6.6) 66(12.5,-6.2) 67(12.5,-5.8) 68(12.5,-5.4) 69(12.5,-5) 70(12.5,-4.6) 71(12.5,-4.2) 72(12.5,-3.8) 73(12.5,-3.4) 74(12.5,-3) 75(12.5,-2.6) 76(12.5,-2.2) 77(12.5,-1.8) 78(12.5,-1.4) 79(12.5,-1) 80(12.5,-0.6) 81(12.5,-0.2) 82(12.5,0.2) 83(12.5,0.6) 84(12.5,1) 85(12.5,1.4) 86(12.5,1.8) 87(12.5,2.2) 88(12.5,2.6) 89(12.5,3) 90(12.5,3.4) 91(12.5,3.8) 92(12.5,4.2) 93(12.5,4.6) 94(12.5,5) 95(12.5,5.4) 96(12.5,5.8) 97(12.5,6.2) 98(12.5,6.6) 99(12.5,7) 100(12.5,7.4) 101(12.5,7.8) 102(12.5,8.2) 103(12.5,8.6) 104(12.5,9) 105(12.5,9.4) 106(12.5,9.8) 107(12.5,10.2) 108(12.5,10.6) 163(-12.497,10.6) 164(-12.497,10.2) 165(-12.497,9.8) 166(-12.497,9.4) 167(-12.497,9) 168(-12.497,8.6) 169(-12.497,8.2) 170(-12.497,7.8) 171(-12.497,7.4) 172(-12.497,7) 173(-12.497,6.6) 174(-12.497,6.2) 175(-12.497,5.8) 176(-12.497,5.4) 177(-12.497,5) 178(-12.497,4.6) 179(-12.497,4.2) 180(-12.497,3.8) 181(-12.497,3.4) 182(-12.497,3) 183(-12.497,2.6) 184(-12.497,2.2) 185(-12.497,1.8) 186(-12.497,1.4) 187(-12.497,1) 188(-12.497,0.6) 189(-12.497,0.2) 190(-12.497,-0.2) 191(-12.497,-0.6) 192(-12.497,-1) 193(-12.497,-1.4) 194(-12.497,-1.8) 195(-12.497,-2.2) 196(-12.497,-2.6) 197(-12.497,-3) 198(-12.497,-3.4) 199(-12.497,-3.8) 200(-12.497,-4.2) 201(-12.497,-4.6) 202(-12.497,-5) 203(-12.497,-5.4) 204(-12.497,-5.8) 205(-12.497,-6.2) 206(-12.497,-6.6) 207(-12.497,-7) 208(-12.497,-7.4) 209(-12.497,-7.8) 210(-12.497,-8.2) 211(-12.497,-8.6) 212(-12.497,-9) 213(-12.497,-9.4) 214(-12.497,-9.8) 215(-12.497,-10.2) 216(-12.497,-10.6)
Top Overlay:
  circle w0.254: c-9.142,-9.144 r1.016
  circle w0.508: c-11.557,-12.827 r0.25
  lines w0.254: -10.92,-10.922 -10.92,10.922 10.924,10.922 10.924,-10.922 -10.92,-10.922
Mechanical 13:
  circle w0.1: c-11.098,-11.1 r0.5
  lines w0.1: -11.998,-12 12.002,-12 12.002,12 -11.998,12 -11.998,-12
Mechanical 15:
  circle w0.05: c0.002,0 r0.35
  lines w0.05: -0.498,0 0.502,0 ; 0.002,-0.5 0.002,0.5
  lines w0.1: -13.589,-13.589 -13.589,13.589 13.589,13.589 13.589,-13.589 -13.589,-13.589
3D body "LQFP216-24x24.STEP": height 1.45, standoff -0.01, extent -13.001,-13.003 13.004,13.003

## LQFP216 24x24_M [mm] "216脚，体宽24x24mm，脚距0.4mm      淘宝ID:黄晶宝石"
pads (216):
  oval 0.26x2.1 smd: 1(-10.6,-12.727) 2(-10.2,-12.727) 3(-9.8,-12.727) 4(-9.4,-12.727) 5(-9,-12.727) 6(-8.6,-12.727) 7(-8.2,-12.727) 8(-7.8,-12.727) 9(-7.4,-12.727) 10(-7,-12.727) 11(-6.6,-12.727) 12(-6.2,-12.727) 13(-5.8,-12.727) 14(-5.4,-12.727) 15(-5,-12.727) 16(-4.6,-12.727) 17(-4.2,-12.727) 18(-3.8,-12.727) 19(-3.4,-12.727) 20(-3,-12.727) 21(-2.6,-12.727) 22(-2.2,-12.727) 23(-1.8,-12.727) 24(-1.4,-12.727) 25(-1,-12.727) 26(-0.6,-12.727) 27(-0.2,-12.727) 28(0.2,-12.727) 29(0.6,-12.727) 30(1,-12.727) 31(1.4,-12.727) 32(1.8,-12.727) 33(2.2,-12.727) 34(2.6,-12.727) 35(3,-12.727) 36(3.4,-12.727) 37(3.8,-12.727) 38(4.2,-12.727) 39(4.6,-12.727) 40(5,-12.727) 41(5.4,-12.727) 42(5.8,-12.727) 43(6.2,-12.727) 44(6.6,-12.727) 45(7,-12.727) 46(7.4,-12.727) 47(7.8,-12.727) 48(8.2,-12.727) 49(8.6,-12.727) 50(9,-12.727) 51(9.4,-12.727) 52(9.8,-12.727) 53(10.2,-12.727) 54(10.6,-12.727) 109(10.6,12.727) 110(10.2,12.727) 111(9.8,12.727) 112(9.4,12.727) 113(9,12.727) 114(8.6,12.727) 115(8.2,12.727) 116(7.8,12.727) 117(7.4,12.727) 118(7,12.727) 119(6.6,12.727) 120(6.2,12.727) 121(5.8,12.727) 122(5.4,12.727) 123(5,12.727) 124(4.6,12.727) 125(4.2,12.727) 126(3.8,12.727) 127(3.4,12.727) 128(3,12.727) 129(2.6,12.727) 130(2.2,12.727) 131(1.8,12.727) 132(1.4,12.727) 133(1,12.727) 134(0.6,12.727) 135(0.2,12.727) 136(-0.2,12.727) 137(-0.6,12.727) 138(-1,12.727) 139(-1.4,12.727) 140(-1.8,12.727) 141(-2.2,12.727) 142(-2.6,12.727) 143(-3,12.727) 144(-3.4,12.727) 145(-3.8,12.727) 146(-4.2,12.727) 147(-4.6,12.727) 148(-5,12.727) 149(-5.4,12.727) 150(-5.8,12.727) 151(-6.2,12.727) 152(-6.6,12.727) 153(-7,12.727) 154(-7.4,12.727) 155(-7.8,12.727) 156(-8.2,12.727) 157(-8.6,12.727) 158(-9,12.727) 159(-9.4,12.727) 160(-9.8,12.727) 161(-10.2,12.727) 162(-10.6,12.727)
  oval 2.1x0.26 smd: 55(12.727,-10.6) 56(12.727,-10.2) 57(12.727,-9.8) 58(12.727,-9.4) 59(12.727,-9) 60(12.727,-8.6) 61(12.727,-8.2) 62(12.727,-7.8) 63(12.727,-7.4) 64(12.727,-7) 65(12.727,-6.6) 66(12.727,-6.2) 67(12.727,-5.8) 68(12.727,-5.4) 69(12.727,-5) 70(12.727,-4.6) 71(12.727,-4.2) 72(12.727,-3.8) 73(12.727,-3.4) 74(12.727,-3) 75(12.727,-2.6) 76(12.727,-2.2) 77(12.727,-1.8) 78(12.727,-1.4) 79(12.727,-1) 80(12.727,-0.6) 81(12.727,-0.2) 82(12.727,0.2) 83(12.727,0.6) 84(12.727,1) 85(12.727,1.4) 86(12.727,1.8) 87(12.727,2.2) 88(12.727,2.6) 89(12.727,3) 90(12.727,3.4) 91(12.727,3.8) 92(12.727,4.2) 93(12.727,4.6) 94(12.727,5) 95(12.727,5.4) 96(12.727,5.8) 97(12.727,6.2) 98(12.727,6.6) 99(12.727,7) 100(12.727,7.4) 101(12.727,7.8) 102(12.727,8.2) 103(12.727,8.6) 104(12.727,9) 105(12.727,9.4) 106(12.727,9.8) 107(12.727,10.2) 108(12.727,10.6) 163(-12.727,10.6) 164(-12.727,10.2) 165(-12.727,9.8) 166(-12.727,9.4) 167(-12.727,9) 168(-12.727,8.6) 169(-12.727,8.2) 170(-12.727,7.8) 171(-12.727,7.4) 172(-12.727,7) 173(-12.727,6.6) 174(-12.727,6.2) 175(-12.727,5.8) 176(-12.727,5.4) 177(-12.727,5) 178(-12.727,4.6) 179(-12.727,4.2) 180(-12.727,3.8) 181(-12.727,3.4) 182(-12.727,3) 183(-12.727,2.6) 184(-12.727,2.2) 185(-12.727,1.8) 186(-12.727,1.4) 187(-12.727,1) 188(-12.727,0.6) 189(-12.727,0.2) 190(-12.727,-0.2) 191(-12.727,-0.6) 192(-12.727,-1) 193(-12.727,-1.4) 194(-12.727,-1.8) 195(-12.727,-2.2) 196(-12.727,-2.6) 197(-12.727,-3) 198(-12.727,-3.4) 199(-12.727,-3.8) 200(-12.727,-4.2) 201(-12.727,-4.6) 202(-12.727,-5) 203(-12.727,-5.4) 204(-12.727,-5.8) 205(-12.727,-6.2) 206(-12.727,-6.6) 207(-12.727,-7) 208(-12.727,-7.4) 209(-12.727,-7.8) 210(-12.727,-8.2) 211(-12.727,-8.6) 212(-12.727,-9) 213(-12.727,-9.4) 214(-12.727,-9.8) 215(-12.727,-10.2) 216(-12.727,-10.6)
Top Overlay:
  circle w0.508: c-11.557,-13.208 r0.25
  circle w0.254: c-9.144,-9.144 r1.016
  lines w0.254: -10.922,-10.922 10.922,-10.922 10.922,10.922 -10.922,10.922 -10.922,-10.922
Mechanical 13:
  circle w0.1: c-11.1,-11.1 r0.5
  lines w0.1: -12,-12 -12,12 12,12 12,-12 -12,-12
Mechanical 15:
  circle w0.05: c0,0 r0.35
  lines w0.05: -0.5,0 0.5,0 ; 0,-0.5 0,0.5
  lines w0.1: -14.097,-14.097 14.097,-14.097 14.097,14.097 -14.097,14.097 -14.097,-14.097
3D body "LQFP216-24x24.STEP": height 1.45, standoff -0.01, extent -13.003,-13.003 13.003,13.003

## LQFP216 24x24_N [mm] "216脚，体宽24x24mm，脚距0.4mm      淘宝ID:黄晶宝石"
pads (216):
  oval 0.23x1.8 smd: 1(-10.6,-12.551) 2(-10.2,-12.551) 3(-9.8,-12.551) 4(-9.4,-12.551) 5(-9,-12.551) 6(-8.6,-12.551) 7(-8.2,-12.551) 8(-7.8,-12.551) 9(-7.4,-12.551) 10(-7,-12.551) 11(-6.6,-12.551) 12(-6.2,-12.551) 13(-5.8,-12.551) 14(-5.4,-12.551) 15(-5,-12.551) 16(-4.6,-12.551) 17(-4.2,-12.551) 18(-3.8,-12.551) 19(-3.4,-12.551) 20(-3,-12.551) 21(-2.6,-12.551) 22(-2.2,-12.551) 23(-1.8,-12.551) 24(-1.4,-12.551) 25(-1,-12.551) 26(-0.6,-12.551) 27(-0.2,-12.551) 28(0.2,-12.551) 29(0.6,-12.551) 30(1,-12.551) 31(1.4,-12.551) 32(1.8,-12.551) 33(2.2,-12.551) 34(2.6,-12.551) 35(3,-12.551) 36(3.4,-12.551) 37(3.8,-12.551) 38(4.2,-12.551) 39(4.6,-12.551) 40(5,-12.551) 41(5.4,-12.551) 42(5.8,-12.551) 43(6.2,-12.551) 44(6.6,-12.551) 45(7,-12.551) 46(7.4,-12.551) 47(7.8,-12.551) 48(8.2,-12.551) 49(8.6,-12.551) 50(9,-12.551) 51(9.4,-12.551) 52(9.8,-12.551) 53(10.2,-12.551) 54(10.6,-12.551) 109(10.6,12.548) 110(10.2,12.548) 111(9.8,12.548) 112(9.4,12.548) 113(9,12.548) 114(8.6,12.548) 115(8.2,12.548) 116(7.8,12.548) 117(7.4,12.548) 118(7,12.548) 119(6.6,12.548) 120(6.2,12.548) 121(5.8,12.548) 122(5.4,12.548) 123(5,12.548) 124(4.6,12.548) 125(4.2,12.548) 126(3.8,12.548) 127(3.4,12.548) 128(3,12.548) 129(2.6,12.548) 130(2.2,12.548) 131(1.8,12.548) 132(1.4,12.548) 133(1,12.548) 134(0.6,12.548) 135(0.2,12.548) 136(-0.2,12.548) 137(-0.6,12.548) 138(-1,12.548) 139(-1.4,12.548) 140(-1.8,12.548) 141(-2.2,12.548) 142(-2.6,12.548) 143(-3,12.548) 144(-3.4,12.548) 145(-3.8,12.548) 146(-4.2,12.548) 147(-4.6,12.548) 148(-5,12.548) 149(-5.4,12.548) 150(-5.8,12.548) 151(-6.2,12.548) 152(-6.6,12.548) 153(-7,12.548) 154(-7.4,12.548) 155(-7.8,12.548) 156(-8.2,12.548) 157(-8.6,12.548) 158(-9,12.548) 159(-9.4,12.548) 160(-9.8,12.548) 161(-10.2,12.548) 162(-10.6,12.548)
  oval 1.8x0.23 smd: 55(12.549,-10.602) 56(12.549,-10.202) 57(12.549,-9.802) 58(12.549,-9.402) 59(12.549,-9.002) 60(12.549,-8.602) 61(12.549,-8.202) 62(12.549,-7.802) 63(12.549,-7.402) 64(12.549,-7.002) 65(12.549,-6.602) 66(12.549,-6.202) 67(12.549,-5.802) 68(12.549,-5.402) 69(12.549,-5.002) 70(12.549,-4.602) 71(12.549,-4.202) 72(12.549,-3.802) 73(12.549,-3.402) 74(12.549,-3.002) 75(12.549,-2.602) 76(12.549,-2.202) 77(12.549,-1.802) 78(12.549,-1.402) 79(12.549,-1.002) 80(12.549,-0.602) 81(12.549,-0.202) 82(12.549,0.198) 83(12.549,0.598) 84(12.549,0.998) 85(12.549,1.398) 86(12.549,1.798) 87(12.549,2.198) 88(12.549,2.598) 89(12.549,2.998) 90(12.549,3.398) 91(12.549,3.798) 92(12.549,4.198) 93(12.549,4.598) 94(12.549,4.998) 95(12.549,5.398) 96(12.549,5.798) 97(12.549,6.198) 98(12.549,6.598) 99(12.549,6.998) 100(12.549,7.398) 101(12.549,7.798) 102(12.549,8.198) 103(12.549,8.598) 104(12.549,8.998) 105(12.549,9.398) 106(12.549,9.798) 107(12.549,10.198) 108(12.549,10.598) 163(-12.549,10.598) 164(-12.549,10.198) 165(-12.549,9.798) 166(-12.549,9.398) 167(-12.549,8.998) 168(-12.549,8.598) 169(-12.549,8.198) 170(-12.549,7.798) 171(-12.549,7.398) 172(-12.549,6.998) 173(-12.549,6.598) 174(-12.549,6.198) 175(-12.549,5.798) 176(-12.549,5.398) 177(-12.549,4.998) 178(-12.549,4.598) 179(-12.549,4.198) 180(-12.549,3.798) 181(-12.549,3.398) 182(-12.549,2.998) 183(-12.549,2.598) 184(-12.549,2.198) 185(-12.549,1.798) 186(-12.549,1.398) 187(-12.549,0.998) 188(-12.549,0.598) 189(-12.549,0.198) 190(-12.549,-0.202) 191(-12.549,-0.602) 192(-12.549,-1.002) 193(-12.549,-1.402) 194(-12.549,-1.802) 195(-12.549,-2.202) 196(-12.549,-2.602) 197(-12.549,-3.002) 198(-12.549,-3.402) 199(-12.549,-3.802) 200(-12.549,-4.202) 201(-12.549,-4.602) 202(-12.549,-5.002) 203(-12.549,-5.402) 204(-12.549,-5.802) 205(-12.549,-6.202) 206(-12.549,-6.602) 207(-12.549,-7.002) 208(-12.549,-7.402) 209(-12.549,-7.802) 210(-12.549,-8.202) 211(-12.549,-8.602) 212(-12.549,-9.002) 213(-12.549,-9.402) 214(-12.549,-9.802) 215(-12.549,-10.202) 216(-12.549,-10.602)
Top Overlay:
  circle w0.254: c-9.144,-9.146 r1.016
  circle w0.508: c-11.557,-12.827 r0.25
  lines w0.254: -10.922,-10.924 -10.922,10.92 10.922,10.92 10.922,-10.924 -10.922,-10.924
Mechanical 13:
  circle w0.1: c-11.1,-11.102 r0.5
  lines w0.1: -12,-12.002 12,-12.002 12,11.998 -12,11.998 -12,-12.002
Mechanical 15:
  circle w0.05: c0,-0.002 r0.35
  lines w0.05: -0.5,-0.002 0.5,-0.002 ; 0,-0.502 0,0.498
  lines w0.1: -13.716,-13.716 -13.716,13.716 13.716,13.716 13.716,-13.716 -13.716,-13.716
3D body "LQFP216-24x24.STEP": height 1.45, standoff -0.01, extent -13.003,-13.004 13.003,13.001

## LQFP216-24*24 [mm] "24x24mm，0.4mm       淘宝ID:黄晶宝石"
pads (216):
  oval 0.23x1.8 smd: 1(-10.6,-12.551) 2(-10.2,-12.551) 3(-9.8,-12.551) 4(-9.4,-12.551) 5(-9,-12.551) 6(-8.6,-12.551) 7(-8.2,-12.551) 8(-7.8,-12.551) 9(-7.4,-12.551) 10(-7,-12.551) 11(-6.6,-12.551) 12(-6.2,-12.551) 13(-5.8,-12.551) 14(-5.4,-12.551) 15(-5,-12.551) 16(-4.6,-12.551) 17(-4.2,-12.551) 18(-3.8,-12.551) 19(-3.4,-12.551) 20(-3,-12.551) 21(-2.6,-12.551) 22(-2.2,-12.551) 23(-1.8,-12.551) 24(-1.4,-12.551) 25(-1,-12.551) 26(-0.6,-12.551) 27(-0.2,-12.551) 28(0.2,-12.551) 29(0.6,-12.551) 30(1,-12.551) 31(1.4,-12.551) 32(1.8,-12.551) 33(2.2,-12.551) 34(2.6,-12.551) 35(3,-12.551) 36(3.4,-12.551) 37(3.8,-12.551) 38(4.2,-12.551) 39(4.6,-12.551) 40(5,-12.551) 41(5.4,-12.551) 42(5.8,-12.551) 43(6.2,-12.551) 44(6.6,-12.551) 45(7,-12.551) 46(7.4,-12.551) 47(7.8,-12.551) 48(8.2,-12.551) 49(8.6,-12.551) 50(9,-12.551) 51(9.4,-12.551) 52(9.8,-12.551) 53(10.2,-12.551) 54(10.6,-12.551) 109(10.6,12.548) 110(10.2,12.548) 111(9.8,12.548) 112(9.4,12.548) 113(9,12.548) 114(8.6,12.548) 115(8.2,12.548) 116(7.8,12.548) 117(7.4,12.548) 118(7,12.548) 119(6.6,12.548) 120(6.2,12.548) 121(5.8,12.548) 122(5.4,12.548) 123(5,12.548) 124(4.6,12.548) 125(4.2,12.548) 126(3.8,12.548) 127(3.4,12.548) 128(3,12.548) 129(2.6,12.548) 130(2.2,12.548) 131(1.8,12.548) 132(1.4,12.548) 133(1,12.548) 134(0.6,12.548) 135(0.2,12.548) 136(-0.2,12.548) 137(-0.6,12.548) 138(-1,12.548) 139(-1.4,12.548) 140(-1.8,12.548) 141(-2.2,12.548) 142(-2.6,12.548) 143(-3,12.548) 144(-3.4,12.548) 145(-3.8,12.548) 146(-4.2,12.548) 147(-4.6,12.548) 148(-5,12.548) 149(-5.4,12.548) 150(-5.8,12.548) 151(-6.2,12.548) 152(-6.6,12.548) 153(-7,12.548) 154(-7.4,12.548) 155(-7.8,12.548) 156(-8.2,12.548) 157(-8.6,12.548) 158(-9,12.548) 159(-9.4,12.548) 160(-9.8,12.548) 161(-10.2,12.548) 162(-10.6,12.548)
  oval 1.8x0.23 smd: 55(12.549,-10.602) 56(12.549,-10.202) 57(12.549,-9.802) 58(12.549,-9.402) 59(12.549,-9.002) 60(12.549,-8.602) 61(12.549,-8.202) 62(12.549,-7.802) 63(12.549,-7.402) 64(12.549,-7.002) 65(12.549,-6.602) 66(12.549,-6.202) 67(12.549,-5.802) 68(12.549,-5.402) 69(12.549,-5.002) 70(12.549,-4.602) 71(12.549,-4.202) 72(12.549,-3.802) 73(12.549,-3.402) 74(12.549,-3.002) 75(12.549,-2.602) 76(12.549,-2.202) 77(12.549,-1.802) 78(12.549,-1.402) 79(12.549,-1.002) 80(12.549,-0.602) 81(12.549,-0.202) 82(12.549,0.198) 83(12.549,0.598) 84(12.549,0.998) 85(12.549,1.398) 86(12.549,1.798) 87(12.549,2.198) 88(12.549,2.598) 89(12.549,2.998) 90(12.549,3.398) 91(12.549,3.798) 92(12.549,4.198) 93(12.549,4.598) 94(12.549,4.998) 95(12.549,5.398) 96(12.549,5.798) 97(12.549,6.198) 98(12.549,6.598) 99(12.549,6.998) 100(12.549,7.398) 101(12.549,7.798) 102(12.549,8.198) 103(12.549,8.598) 104(12.549,8.998) 105(12.549,9.398) 106(12.549,9.798) 107(12.549,10.198) 108(12.549,10.598) 163(-12.549,10.598) 164(-12.549,10.198) 165(-12.549,9.798) 166(-12.549,9.398) 167(-12.549,8.998) 168(-12.549,8.598) 169(-12.549,8.198) 170(-12.549,7.798) 171(-12.549,7.398) 172(-12.549,6.998) 173(-12.549,6.598) 174(-12.549,6.198) 175(-12.549,5.798) 176(-12.549,5.398) 177(-12.549,4.998) 178(-12.549,4.598) 179(-12.549,4.198) 180(-12.549,3.798) 181(-12.549,3.398) 182(-12.549,2.998) 183(-12.549,2.598) 184(-12.549,2.198) 185(-12.549,1.798) 186(-12.549,1.398) 187(-12.549,0.998) 188(-12.549,0.598) 189(-12.549,0.198) 190(-12.549,-0.202) 191(-12.549,-0.602) 192(-12.549,-1.002) 193(-12.549,-1.402) 194(-12.549,-1.802) 195(-12.549,-2.202) 196(-12.549,-2.602) 197(-12.549,-3.002) 198(-12.549,-3.402) 199(-12.549,-3.802) 200(-12.549,-4.202) 201(-12.549,-4.602) 202(-12.549,-5.002) 203(-12.549,-5.402) 204(-12.549,-5.802) 205(-12.549,-6.202) 206(-12.549,-6.602) 207(-12.549,-7.002) 208(-12.549,-7.402) 209(-12.549,-7.802) 210(-12.549,-8.202) 211(-12.549,-8.602) 212(-12.549,-9.002) 213(-12.549,-9.402) 214(-12.549,-9.802) 215(-12.549,-10.202) 216(-12.549,-10.602)
Top Overlay:
  circle w0.508: c-11.557,-12.827 r0.25
  lines w0.254: -10.922,-10.924 10.922,-10.924 10.922,10.92 -10.922,10.92 -10.922,-10.924
Mechanical 13:
  lines w0.1: -12,-12.002 -12,11.998 12,11.998 12,-12.002 -12,-12.002
3D body "LQFP216-24x24.STEP": height 1.45, standoff 0, extent -12.954,-12.954 13.052,13.052

## LQFP256 28x28_L [mm] "256脚，体宽28x28mm，脚距0.4mm      淘宝ID:黄晶宝石"
pads (256):
  oval 0.2x1.5 smd: 1(-12.605,-14.497) 2(-12.205,-14.497) 3(-11.805,-14.497) 4(-11.405,-14.497) 5(-11.005,-14.497) 6(-10.605,-14.497) 7(-10.205,-14.497) 8(-9.805,-14.497) 9(-9.405,-14.497) 10(-9.005,-14.497) 11(-8.605,-14.497) 12(-8.205,-14.497) 13(-7.805,-14.497) 14(-7.405,-14.497) 15(-7.005,-14.497) 16(-6.605,-14.497) 17(-6.205,-14.497) 18(-5.805,-14.497) 19(-5.405,-14.497) 20(-5.005,-14.497) 21(-4.605,-14.497) 22(-4.205,-14.497) 23(-3.805,-14.497) 24(-3.405,-14.497) 25(-3.005,-14.497) 26(-2.605,-14.497) 27(-2.205,-14.497) 28(-1.805,-14.497) 29(-1.405,-14.497) 30(-1.005,-14.497) 31(-0.605,-14.497) 32(-0.205,-14.497) 33(0.195,-14.497) 34(0.595,-14.497) 35(0.995,-14.497) 36(1.395,-14.497) 37(1.795,-14.497) 38(2.195,-14.497) 39(2.595,-14.497) 40(2.995,-14.497) 41(3.395,-14.497) 42(3.795,-14.497) 43(4.195,-14.497) 44(4.595,-14.497) 45(4.995,-14.497) 46(5.395,-14.497) 47(5.795,-14.497) 48(6.195,-14.497) 49(6.595,-14.497) 50(6.995,-14.497) 51(7.395,-14.497) 52(7.795,-14.497) 53(8.195,-14.497) 54(8.595,-14.497) 55(8.995,-14.497) 56(9.395,-14.497) 57(9.795,-14.497) 58(10.195,-14.497) 59(10.595,-14.497) 60(10.995,-14.497) 61(11.395,-14.497) 62(11.795,-14.497) 63(12.195,-14.497) 64(12.595,-14.497) 129(12.595,14.5) 130(12.195,14.5) 131(11.795,14.5) 132(11.395,14.5) 133(10.995,14.5) 134(10.595,14.5) 135(10.195,14.5) 136(9.795,14.5) 137(9.395,14.5) 138(8.995,14.5) 139(8.595,14.5) 140(8.195,14.5) 141(7.795,14.5) 142(7.395,14.5) 143(6.995,14.5) 144(6.595,14.5) 145(6.195,14.5) 146(5.795,14.5) 147(5.395,14.5) 148(4.995,14.5) 149(4.595,14.5) 150(4.195,14.5) 151(3.795,14.5) 152(3.395,14.5) 153(2.995,14.5) 154(2.595,14.5) 155(2.195,14.5) 156(1.795,14.5) 157(1.395,14.5) 158(0.995,14.5) 159(0.595,14.5) 160(0.195,14.5) 161(-0.205,14.5) 162(-0.605,14.5) 163(-1.005,14.5) 164(-1.405,14.5) 165(-1.805,14.5) 166(-2.205,14.5) 167(-2.605,14.5) 168(-3.005,14.5) 169(-3.405,14.5) 170(-3.805,14.5) 171(-4.205,14.5) 172(-4.605,14.5) 173(-5.005,14.5) 174(-5.405,14.5) 175(-5.805,14.5) 176(-6.205,14.5) 177(-6.605,14.5) 178(-7.005,14.5) 179(-7.405,14.5) 180(-7.805,14.5) 181(-8.205,14.5) 182(-8.605,14.5) 183(-9.005,14.5) 184(-9.405,14.5) 185(-9.805,14.5) 186(-10.205,14.5) 187(-10.605,14.5) 188(-11.005,14.5) 189(-11.405,14.5) 190(-11.805,14.5) 191(-12.205,14.5) 192(-12.605,14.5)
  oval 1.5x0.2 smd: 65(14.493,-12.598) 66(14.493,-12.198) 67(14.493,-11.798) 68(14.493,-11.398) 69(14.493,-10.998) 70(14.493,-10.598) 71(14.493,-10.198) 72(14.493,-9.798) 73(14.493,-9.398) 74(14.493,-8.998) 75(14.493,-8.598) 76(14.493,-8.198) 77(14.493,-7.798) 78(14.493,-7.398) 79(14.493,-6.998) 80(14.493,-6.598) 81(14.493,-6.198) 82(14.493,-5.798) 83(14.493,-5.398) 84(14.493,-4.998) 85(14.493,-4.598) 86(14.493,-4.198) 87(14.493,-3.798) 88(14.493,-3.398) 89(14.493,-2.998) 90(14.493,-2.598) 91(14.493,-2.198) 92(14.493,-1.798) 93(14.493,-1.398) 94(14.493,-0.998) 95(14.493,-0.598) 96(14.493,-0.198) 97(14.493,0.202) 98(14.493,0.602) 99(14.493,1.002) 100(14.493,1.402) 101(14.493,1.802) 102(14.493,2.202) 103(14.493,2.602) 104(14.493,3.002) 105(14.493,3.402) 106(14.493,3.802) 107(14.493,4.202) 108(14.493,4.602) 109(14.493,5.002) 110(14.493,5.402) 111(14.493,5.802) 112(14.493,6.202) 113(14.493,6.602) 114(14.493,7.002) 115(14.493,7.402) 116(14.493,7.802) 117(14.493,8.202) 118(14.493,8.602) 119(14.493,9.002) 120(14.493,9.402) 121(14.493,9.802) 122(14.493,10.202) 123(14.493,10.602) 124(14.493,11.002) 125(14.493,11.402) 126(14.493,11.802) 127(14.493,12.202) 128(14.493,12.602) 193(-14.503,12.602) 194(-14.503,12.202) 195(-14.503,11.802) 196(-14.503,11.402) 197(-14.503,11.002) 198(-14.503,10.602) 199(-14.503,10.202) 200(-14.503,9.802) 201(-14.503,9.402) 202(-14.503,9.002) 203(-14.503,8.602) 204(-14.503,8.202) 205(-14.503,7.802) 206(-14.503,7.402) 207(-14.503,7.002) 208(-14.503,6.602) 209(-14.503,6.202) 210(-14.503,5.802) 211(-14.503,5.402) 212(-14.503,5.002) 213(-14.503,4.602) 214(-14.503,4.202) 215(-14.503,3.802) 216(-14.503,3.402) 217(-14.503,3.002) 218(-14.503,2.602) 219(-14.503,2.202) 220(-14.503,1.802) 221(-14.503,1.402) 222(-14.503,1.002) 223(-14.503,0.602) 224(-14.503,0.202) 225(-14.503,-0.198) 226(-14.503,-0.598) 227(-14.503,-0.998) 228(-14.503,-1.398) 229(-14.503,-1.798) 230(-14.503,-2.198) 231(-14.503,-2.598) 232(-14.503,-2.998) 233(-14.503,-3.398) 234(-14.503,-3.798) 235(-14.503,-4.198) 236(-14.503,-4.598) 237(-14.503,-4.998) 238(-14.503,-5.398) 239(-14.503,-5.798) 240(-14.503,-6.198) 241(-14.503,-6.598) 242(-14.503,-6.998) 243(-14.503,-7.398) 244(-14.503,-7.798) 245(-14.503,-8.198) 246(-14.503,-8.598) 247(-14.503,-8.998) 248(-14.503,-9.398) 249(-14.503,-9.798) 250(-14.503,-10.198) 251(-14.503,-10.598) 252(-14.503,-10.998) 253(-14.503,-11.398) 254(-14.503,-11.798) 255(-14.503,-12.198) 256(-14.503,-12.598)
Top Overlay:
  circle w0.254: c-11.435,-11.428 r1.016
  circle w0.508: c-13.589,-14.732 r0.25
  lines w0.254: -13.005,-13.079 -13.005,12.956 12.949,12.956 12.949,-13.079 -13.005,-13.079
Mechanical 13:
  circle w0.1: c-13.105,-13.098 r0.5
  lines w0.1: -14.005,-13.998 -14.005,14.002 13.995,14.002 13.995,-13.998 -14.005,-13.998
Mechanical 15:
  circle w0.05: c-0.005,0.002 r0.35
  lines w0.05: -0.505,0.002 0.495,0.002 ; -0.005,-0.498 -0.005,0.502
  lines w0.15: -15.626,-15.619 -15.626,15.623 15.616,15.623 15.616,-15.619 -15.626,-15.619
3D body "LQFP256-28x28.STEP": height 1.45, standoff -0.01, extent -15.008,-15.001 14.998,15.004